# Altium footprint library PcbLib.PcbLib: 20 footprints (part 2 of 2)
Each footprint in its own frame and in the unit in brackets; x right, y up, seen from the top. Pads: shape width x height; smd on the part's side, far side on the other; paste and mask are expansions set on the pad; w line width, h text height; cw(c..) or ccw(c..) is an arc to the next point about the centre after c.
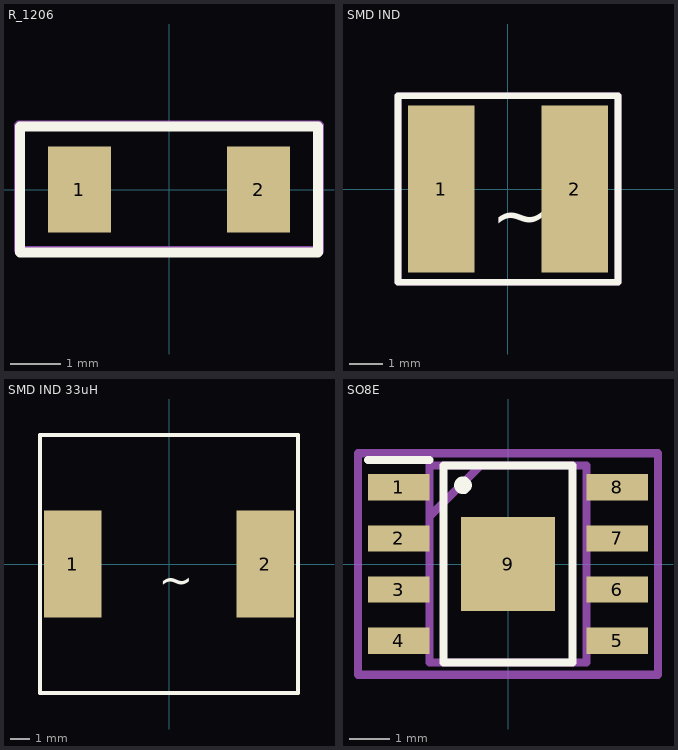
[diagram p1: the footprints below, top view; thin cyan lines are the x and y axes]

## R_1206 [mm] "RES SMD 1206"
pads (2):
  rect 1.25x1.7 smd: 1(-1.775,0) 2(1.775,0)
Top Overlay:
  lines w0.2: -2.95,-1.25 -2.95,1.25 2.95,1.25 2.95,-1.25 -2.95,-1.25
Mechanical 29:
  lines w0.2: -2.972,-1.194 -2.972,1.27 2.972,1.27 2.972,-1.219 -2.946,-1.219
  text ".Designator" at -1.676,-0.508 h1.27
3D body "User Library-res1206-1.step": height 0.55, standoff 0, extent -1.6,-0.8 1.6,0.8

## SMD IND [mm]
pads (2):
  rect 2x5 smd: 1(-2,0) 2(2,0)
Top Overlay:
  lines w0.2: -3.302,-2.794 -3.302,2.794 3.302,2.794 3.302,-2.794 -3.302,-2.794
  text "~" at -0.508,-1.524 h1.52
Mechanical 29:
  lines w0.2: -3.302,-2.794 3.302,-2.794 3.302,2.794 -3.302,2.794 -3.302,-2.794
  text ".Designator" at -2.413,0 h0.6
3D body "ihlp2020czer4r7m11.stp": height 3.29, standoff 0.43, extent -2.751,-2.565 2.7,2.581

## SMD IND 33uH [mm]
pads (2):
  rect 2.9x5.4 smd: 1(-4.85,0) 2(4.85,0)
Top Overlay:
  lines w0.2: -6.5,-6.5 -6.5,6.5 6.5,6.5 6.5,-6.5 -6.5,-6.5
  text "~" at -0.508,-1.524 h1.52
Mechanical 29:
  lines w0.2: -6.5,-6.5 6.5,-6.5 6.5,6.5 -6.5,6.5 -6.5,-6.5
  text ".Designator" at -2.413,0 h0.6
3D body "srr1280-471k.stp": height 7.5, standoff 0, extent -6.25,-6.25 6.25,6.25

## SO8E [mm]
pads (9):
  rect 1.525x0.65 smd: 1(-2.712,1.905) 2(-2.712,0.635) 3(-2.712,-0.635) 4(-2.712,-1.905) 5(2.712,-1.905) 6(2.712,-0.635) 7(2.712,0.635) 8(2.712,1.905)
  rect 2.34x2.34 smd: 9(0,0)
Top Overlay:
  circle w0.254: c-1.118,1.956 r0.092
  lines w0.2: -3.475,2.58 -1.95,2.58 ; -1.6,-2.45 -1.6,2.45 1.6,2.45 1.6,-2.45 -1.6,-2.45
Mechanical 29:
  lines w0.2: -1.95,1.18 -0.68,2.45 ; -3.725,-2.75 -3.725,2.75 3.725,2.75 3.725,-2.75 -3.725,-2.75 ; -1.95,-2.45 1.95,-2.45 1.95,2.45 -1.95,2.45 -1.95,-2.45
  text ".Designator" at -1.295,-1.016 h0.6
3D body "NE555DR.stp": height 1.75, standoff 0, extent -3,-2.45 3,2.45